# EAGLE library part 6210XX21021_62102021021 (library WR-PHD)
WR-PHD 1.27 mm SMT Dual Pin Header, H=3.80 mm Article Properties Pins 4 unitless; 6 unitless; 8 unitless; 10 unitless; 14 unitless; 16 unitless; 20 unitless; 28 unitless; 40 unitless; 44 unitless; 50 unitless General Information Operating Temperature -40 °C up to +105 °C Compliance Lead free / RoHS Pitch 1.27 mm Durability 50 Cycles Rows Dual Gender Pin Header Type Straight Material Properties Insulator Material PA9T Insulator Flammability Rating UL94 V-0 Contact Material Copper Alloy Contact Plating Gold Contact Type Stamped Certification UL Approval E323964 Packaging Properties Packaging Tape and Reel with Cap; Tube Electrical Properties IR 1 A Withstanding Voltage 500 V (AC) Contact Resistance 20 mΩ RISO 1000 MΩ <https://www.we-online.com/components/media/o33195v209%20Family_WR-PDH_621xxx21021.jpg> Details see: www.we-online.com/en/components/products/PHD_1_27_SMT_DUAL_PIN_HEADER_6210XX21021 <www.we-online.com/catalog/PHD_1_27_SMT_DUAL_PIN_HEADER_6210XX21021/?utm_source=eagle_model&utm_medium=description_link&utm_campaign=eisos_eagle> Updated by Ella 2024-01-31 2024 (C) Würth Elektronik
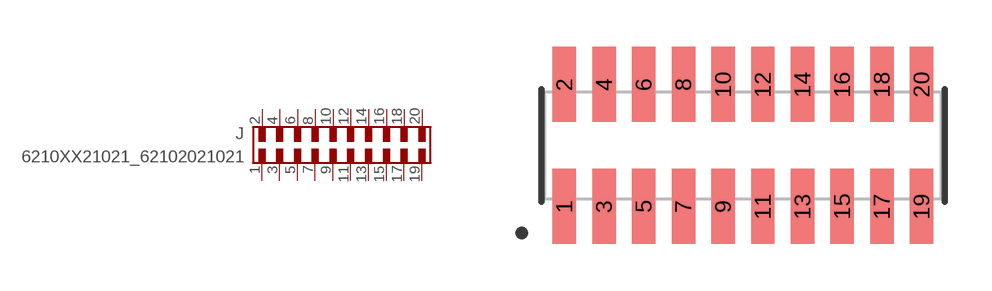
[diagram p399: symbol with the pads of 62102021021; footprint 62102021021]

Designator prefix J

## 6210XX21021_62102021021 (DATASHEET-URL: https://www.we-online.com/redexpert/spec/62102021021?ae; GENDER: Pin Header; IR: 1A; MOUNT: SMT; PACKAGING: Tube; PART-NUMBER: 62102021021; PINS: 20; PITCH: 1.27 mm; ROWS: Dual; TYPE: Straight; VALUE: 62102021021)  [62102021021]
1  1  pas
2  2  pas
3  3  pas
4  4  pas
5  5  pas
6  6  pas
7  7  pas
8  8  pas
9  9  pas
10  10  pas
11  11  pas
12  12  pas
13  13  pas
14  14  pas
15  15  pas
16  16  pas
17  17  pas
18  18  pas
19  19  pas
20  20  pas

## Footprint 62102021021 (pad centres in mm)
WR-PHD 1.27 mm SMT Dual Pin Header, H=3.80 mm, 20 Pins
smd 0.75 x 2.4: 1 -5.715,-1.95; 2 -5.715,1.95; 3 -4.445,-1.95; 4 -4.445,1.95; 5 -3.175,-1.95; 6 -3.175,1.95; 7 -1.905,-1.95; 8 -1.905,1.95; 9 -0.635,-1.95; 10 -0.635,1.95; 11 0.635,-1.95; 12 0.635,1.95; 13 1.905,-1.95; 14 1.905,1.95; 15 3.175,-1.95; 16 3.175,1.95; 17 4.445,-1.95; 18 4.445,1.95; 19 5.715,-1.95; 20 5.715,1.95